# Altium footprint library SamacSys.PcbLib: 1008 footprints (part 39 of 63)
Each footprint in its own frame and in the unit in brackets; x right, y up, seen from the top. Pads: shape width x height; smd on the part's side, far side on the other; paste and mask are expansions set on the pad; w line width, h text height; cw(c..) or ccw(c..) is an arc to the next point about the centre after c.
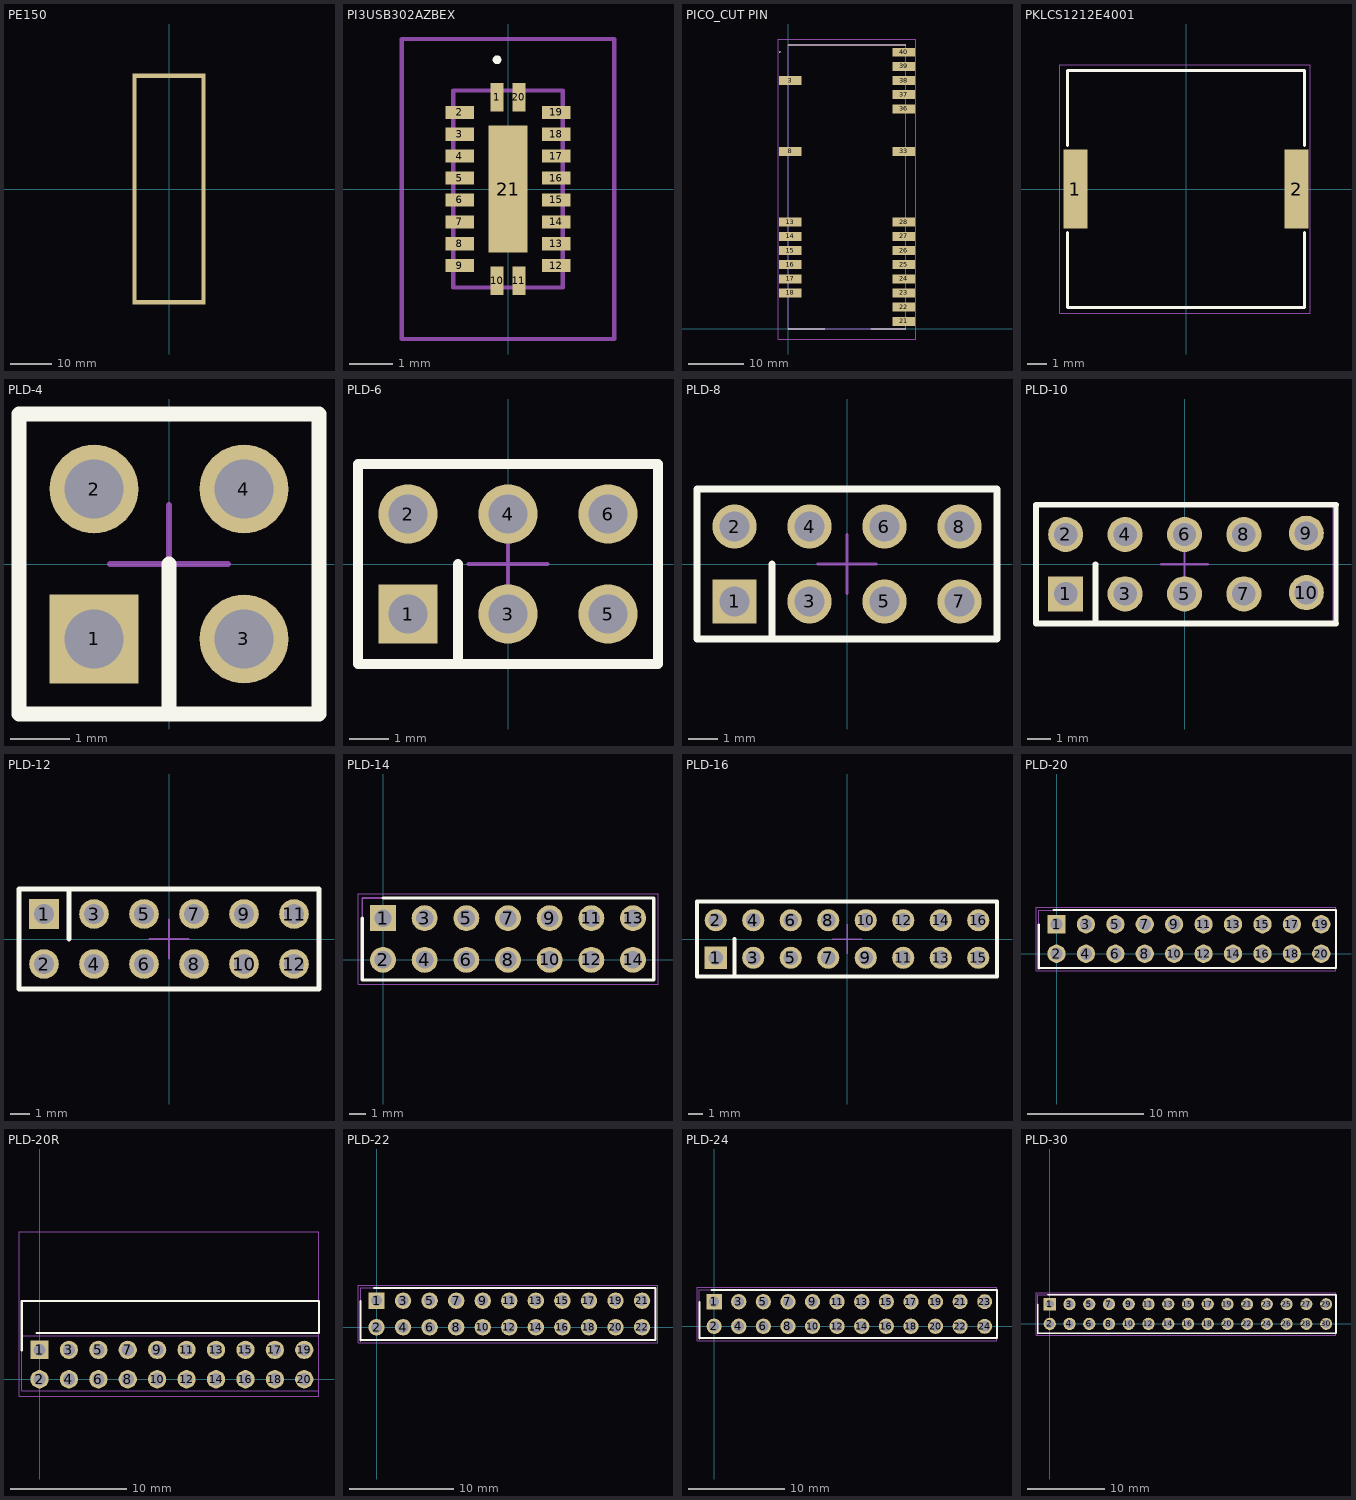
[diagram p38: the footprints below, top view; thin cyan lines are the x and y axes]

## PE150 [mm] "RF COVER"
pads (4):
  rect 1x55.4 smd: 1(-8.3,0) 1(8.3,0)
  rect 17.6x1 smd: 1(0,-27.2) 1(0,27.2)

## PI3USB302AZBEX [mm]
pads (21):
  rect 0.3x0.65 smd: 1(-0.25,2.1) 10(-0.25,-2.1) 11(0.25,-2.1) 20(0.25,2.1)
  rect 0.65x0.3 smd: 2(-1.1,1.75) 3(-1.1,1.25) 4(-1.1,0.75) 5(-1.1,0.25) 6(-1.1,-0.25) 7(-1.1,-0.75) 8(-1.1,-1.25) 9(-1.1,-1.75) 12(1.1,-1.75) 13(1.1,-1.25) 14(1.1,-0.75) 15(1.1,-0.25) 16(1.1,0.25) 17(1.1,0.75) 18(1.1,1.25) 19(1.1,1.75)
  rect 0.9x2.9 smd: 21(0,0)
Top Overlay:
  lines w0.1: -0.25,2.9 ccw(c-0.25,2.95) -0.25,3 ccw(c-0.25,2.95) -0.25,2.9
Assembly:
  lines w0.1: -1.25,-2.25 1.25,-2.25 1.25,2.25 -1.25,2.25 -1.25,-2.25
Countryard:
  lines w0.1: -2.425,-3.425 2.425,-3.425 2.425,3.425 -2.425,3.425 -2.425,-3.425
3D body "PI3USB302-AZBEX.stp": height 1.1, standoff 0, extent -1.25,-2.25 1.25,2.25

## PICO_CUT PIN [mm]
pads (22):
  rect 4x1.6 smd: 3(0.31,44.55) 8(0.31,31.85) 13(0.31,19.15) 14(0.31,16.61) 15(0.31,14.07) 16(0.31,11.53) 17(0.31,8.99) 18(0.31,6.45) 21(20.69,1.37) 22(20.69,3.91) 23(20.69,6.45) 24(20.69,8.99) 25(20.69,11.53) 26(20.69,14.07) 27(20.69,16.61) 28(20.69,19.15) 33(20.69,31.85) 36(20.69,39.47) 37(20.69,42.01) 38(20.69,44.55) 39(20.69,47.09) 40(20.69,49.63)
Top Overlay:
  lines w0.1: 0,0 6.5,0 0,0 ; 0,51 21,51 0,51 ; 14.75,0 21,0 14.75,0
  lines w0.2: -1.6,49.7 ccw(c-1.55,49.7) -1.5,49.7 ; -1.6,49.7 cw(c-1.55,49.7) -1.5,49.7 ; -1.6,49.7 ccw(c-1.55,49.7) -1.5,49.7
Assembly:
  lines w0.2: 0,0 21,0 21,51 0,51 0,0
Countryard:
  lines w0.1: -1.79,-1.8 22.79,-1.8 22.79,52 -1.79,52 -1.79,-1.8
3D body "PICO.stp": height 3.69, standoff 0, extent 0,0.03 21,52.456

## PKLCS1212E4001 [mm]
pads (2):
  rect 1.2x4 smd: 1(-5.6,0) 2(5.6,0)
Top Overlay:
  lines w0.15: -6,-2.2 -6,-6 6,-6 6,-2.2 ; -6,2.2 -6,6 6,6 6,2.2
Countryard:
  lines w0.015: -6.4,-6.3 6.3,-6.3 6.3,6.3 -6.4,6.3 -6.4,-6.3
3D body "PKLCS1212E4001-R1.stp": height 3, standoff 0, extent -6.05,-6 5.95,6

## PLD-4 [mm]
height 10
pads (4):
  rect 1.5x1.5 hole 1: 1(-1.27,-1.27)
  round 1.5 hole 1: 2(-1.27,1.27) 3(1.27,-1.27) 4(1.27,1.27)
Top Overlay:
  lines w0.25: 0,-2.54 0,0 ; -2.54,-2.54 -2.54,2.54 2.54,2.54 2.54,-2.54 -2.54,-2.54
Assembly:
  lines w0.1: 0,-2.27 0,0 ; -2.54,-2.54 2.54,-2.54 2.54,2.54 -2.54,2.54 -2.54,-2.54
Countryard:
  lines w0.1: -1,0 1,0 ; 0,-1 0,1 ; -2.54,-2.54 -2.54,2.54 2.54,2.54 2.54,-2.54 -2.54,-2.54

## PLD-6 [mm]
height 10
pads (6):
  rect 1.5x1.5 hole 1: 1(-2.54,-1.27)
  round 1.5 hole 1: 2(-2.54,1.27) 3(0,-1.27) 4(0,1.27) 5(2.54,-1.27) 6(2.54,1.27)
Top Overlay:
  lines w0.25: -1.27,-2.54 -1.27,0 ; -3.81,-2.54 3.81,-2.54 3.81,2.54 -3.81,2.54 -3.81,-2.54
Assembly:
  lines w0.1: -1.27,-2.27 -1.27,0 ; 3.81,-2.54 -3.81,-2.54 -3.81,2.54 3.81,2.54
Countryard:
  lines w0.1: -1,0 1,0 ; 0,-1 0,1 ; 3.81,-2.54 -3.81,-2.54 -3.81,2.54 3.81,2.54
3D body "User Library-PLD6.STEP": height 8.54, standoff -3, extent -3.81,-2.54 3.81,2.54

## PLD-8 [mm]
height 10
pads (8):
  rect 1.5x1.5 hole 1: 1(-3.81,-1.27)
  round 1.5 hole 1: 2(-3.81,1.27) 3(-1.27,-1.27) 4(-1.27,1.27) 5(1.27,-1.27) 6(1.27,1.27) 7(3.81,-1.27) 8(3.81,1.27)
Top Overlay:
  lines w0.25: -2.54,-2.54 -2.54,0 ; -5.08,-2.54 5.08,-2.54 5.08,2.54 -5.08,2.54 -5.08,-2.54
Assembly:
  lines w0.1: -2.54,-2.27 -2.54,0 ; -5.08,-2.54 -5.08,2.54 5.08,2.54 5.08,-2.54 -5.08,-2.54
Countryard:
  lines w0.1: -1,0 1,0 ; 0,-1 0,1 ; -5.08,-2.54 5.08,-2.54 5.08,2.54 -5.08,2.54 -5.08,-2.54
3D body "PLD-8.step": height 8.6, standoff -3, extent -5.08,-2.5 5.08,2.58

## PLD-10 [mm]
pads (10):
  rect 1.5x1.5 hole 1: 1(-5.08,-1.27)
  round 1.5 hole 1: 2(-5.08,1.27) 3(-2.54,-1.27) 4(-2.54,1.27) 5(0,-1.27) 6(0,1.27) 7(2.54,-1.27) 8(2.54,1.27) 9(5.208,1.327) 10(5.208,-1.213)
Top Overlay:
  lines w0.2: 6.478,-2.443 6.478,2.557
  lines w0.25: -3.81,-2.54 -3.81,0 ; 6.478,-2.54 -6.35,-2.54 -6.35,2.54 6.478,2.54
Assembly:
  lines w0.1: -3.81,-2.27 -3.81,0 ; 3.81,-2.54 -6.35,-2.54 -6.35,2.54 6.478,2.54 ; 6.478,-2.443 6.478,2.557
Countryard:
  lines w0.05: 6.35,-2.54 6.35,2.54
  lines w0.1: -1,0 1,0 ; 0,-1 0,1 ; 3.81,-2.54 -6.35,-2.54 -6.35,2.54 6.478,2.54
3D body "User Library-PLD10.STEP": height 8.54, standoff -3, extent -6.35,-2.54 6.35,2.54

## PLD-12 [mm]
height 10
pads (12):
  rect 1.5x1.5 hole 1: 1(-6.35,1.27)
  round 1.5 hole 1: 2(-6.35,-1.27) 3(-3.81,1.27) 4(-3.81,-1.27) 5(-1.27,1.27) 6(-1.27,-1.27) 7(1.27,1.27) 8(1.27,-1.27) 9(3.81,1.27) 10(3.81,-1.27) 11(6.35,1.27) 12(6.35,-1.27)
Top Overlay:
  lines w0.25: -5.08,0 -5.08,2.54 ; -7.62,-2.54 7.62,-2.54 7.62,2.54 -7.62,2.54 -7.62,-2.54
Assembly:
  lines w0.1: -5.08,0 -5.08,2.27 ; -7.62,-2.54 7.62,-2.54 7.62,2.54 -7.62,2.54 -7.62,-2.54
Countryard:
  lines w0.1: -1,0 1,0 ; 0,-1 0,1 ; -7.62,-2.54 7.62,-2.54 7.62,2.54 -7.62,2.54 -7.62,-2.54
3D body "PLS-6.STEP": height 8.9, standoff -2.9, extent -7.62,-2.54 7.62,0
3D body "PLS-6.STEP": height 8.9, standoff -2.9, extent -7.62,0 7.62,2.54

## PLD-14 [mm]
pads (14):
  rect 1.575x1.575 hole 1.05: 1(0,2.54)
  round 1.575 hole 1.05: 2(0,0) 3(2.54,2.54) 4(2.54,0) 5(5.08,2.54) 6(5.08,0) 7(7.62,2.54) 8(7.62,0) 9(10.16,2.54) 10(10.16,0) 11(12.7,2.54) 12(12.7,0) 13(15.24,2.54) 14(15.24,0)
Top Overlay:
  lines w0.2: -1.27,2.54 -1.27,-1.23 16.51,-1.23 16.51,3.77 0,3.77
Assembly:
  lines w0.1: -1.27,-1.23 -1.27,3.77 16.51,3.77 16.51,-1.23 -1.27,-1.23
Countryard:
  lines w0.05: -1.524,-1.48 -1.524,4.02 16.764,4.02 16.764,-1.48 -1.524,-1.48
3D body "User Library-PLD10.STEP": height 8.54, standoff -3, extent -1.27,-1.27 11.43,3.81
3D body "User Library-PLD4.STEP": height 8.54, standoff -3, extent 11.43,-1.27 16.51,3.81

## PLD-16 [mm]
height 10
pads (16):
  rect 1.5x1.5 hole 1: 1(-8.89,-1.27)
  round 1.5 hole 1: 2(-8.89,1.27) 3(-6.35,-1.27) 4(-6.35,1.27) 5(-3.81,-1.27) 6(-3.81,1.27) 7(-1.27,-1.27) 8(-1.27,1.27) 9(1.27,-1.27) 10(1.27,1.27) 11(3.81,-1.27) 12(3.81,1.27) 13(6.35,-1.27) 14(6.35,1.27) 15(8.89,-1.27) 16(8.89,1.27)
Top Overlay:
  lines w0.25: -7.62,-2.54 -7.62,0 ; -10.16,-2.54 -10.16,2.54 0,2.54 10.16,2.54 10.16,-2.54 0,-2.54 -10.16,-2.54
Assembly:
  lines w0.1: -7.62,-2.27 -7.62,0 ; -10.16,-2.54 0,-2.54 10.16,-2.54 10.16,2.54 0,2.54 -10.16,2.54 -10.16,-2.54
Countryard:
  lines w0.1: -1,0 1,0 ; 0,-1 0,1 ; -10.16,-2.54 -10.16,2.54 0,2.54 10.16,2.54 10.16,-2.54 0,-2.54 -10.16,-2.54
3D body "PLD-8.step": height 8.6, standoff -3, extent 0,-2.58 10.16,2.5
3D body "PLD-8.step": height 8.6, standoff -3, extent -10.16,-2.5 0,2.58

## PLD-20 [mm]
pads (20):
  rect 1.575x1.575 hole 1.05: 1(0,2.54)
  round 1.575 hole 1.05: 2(0,0) 3(2.54,2.54) 4(2.54,0) 5(5.08,2.54) 6(5.08,0) 7(7.62,2.54) 8(7.62,0) 9(10.16,2.54) 10(10.16,0) 11(12.7,2.54) 12(12.7,0) 13(15.24,2.54) 14(15.24,0) 15(17.78,2.54) 16(17.78,0) 17(20.32,2.54) 18(20.32,0) 19(22.86,2.54) 20(22.86,0)
Top Overlay:
  lines w0.2: -1.524,-1.23 24.13,-1.23 24.13,3.77 -0.254,3.77 ; -1.52,-1.27 -1.52,2.5
Assembly:
  lines w0.1: -1.524,-1.23 24.13,-1.23 24.13,3.77 -1.524,3.77 -1.524,-1.23
Countryard:
  lines w0.05: -1.77,-1.48 24.13,-1.48 24.13,4.02 -1.77,4.02 -1.77,-1.48
3D body "User Library-PLD4.STEP": height 8.54, standoff -3, extent 19.05,-1.27 24.13,3.81
3D body "User Library-PLD10.STEP": height 8.54, standoff -3, extent -1.27,-1.27 11.43,3.81
3D body "User Library-PLD4.STEP": height 8.54, standoff -3, extent 11.43,-1.27 16.51,3.81
3D body "User Library-PLD4.STEP": height 8.54, standoff -3, extent 16.51,-1.27 21.59,3.81

## PLD-20R [mm]
pads (20):
  rect 1.575x1.575 hole 1.05: 1(0,2.54)
  round 1.575 hole 1.05: 2(0,0) 3(2.54,2.54) 4(2.54,0) 5(5.08,2.54) 6(5.08,0) 7(7.62,2.54) 8(7.62,0) 9(10.16,2.54) 10(10.16,0) 11(12.7,2.54) 12(12.7,0) 13(15.24,2.54) 14(15.24,0) 15(17.78,2.54) 16(17.78,0) 17(20.32,2.54) 18(20.32,0) 19(22.86,2.54) 20(22.86,0)
Top Overlay:
  lines w0.2: -1.52,2.5 -1.52,6.75 24.13,6.75 24.13,4 -0.254,4
Assembly:
  lines w0.1: -1.524,-1 24.13,-1 24.13,3.77 -1.524,3.77 -1.524,-1
Countryard:
  lines w0.05: -1.77,-1.48 24.13,-1.48 24.13,12.75 -1.77,12.75 -1.77,-1.48
3D body "PLD-20R1.step": height 5.08, standoff -3, extent -1.27,-0.36 24.13,12.68

## PLD-22 [mm]
pads (22):
  rect 1.575x1.575 hole 1.05: 1(0,2.54)
  round 1.575 hole 1.05: 2(0,0) 3(2.54,2.54) 4(2.54,0) 5(5.08,2.54) 6(5.08,0) 7(7.62,2.54) 8(7.62,0) 9(10.16,2.54) 10(10.16,0) 11(12.7,2.54) 12(12.7,0) 13(15.24,2.54) 14(15.24,0) 15(17.78,2.54) 16(17.78,0) 17(20.32,2.54) 18(20.32,0) 19(22.86,2.54) 20(22.86,0) 21(25.4,2.54) 22(25.4,0)
Top Overlay:
  lines w0.2: -1.524,-1.23 26.67,-1.23 26.67,3.77 -0.254,3.77 ; -1.52,-1.27 -1.52,2.5
Assembly:
  lines w0.1: -1.524,-1.23 26.67,-1.23 26.67,3.77 -1.524,3.77 -1.524,-1.23
Countryard:
  lines w0.05: -1.77,-1.48 26.924,-1.48 26.924,4.02 -1.77,4.02 -1.77,-1.48
3D body "User Library-PLD10.STEP": height 8.54, standoff -3, extent -1.27,-1.27 11.43,3.81
3D body "User Library-PLD4.STEP": height 8.54, standoff -3, extent 11.43,-1.27 16.51,3.81
3D body "User Library-PLD4.STEP": height 8.54, standoff -3, extent 16.51,-1.27 21.59,3.81
3D body "User Library-PLD4.STEP": height 8.54, standoff -3, extent 21.59,-1.27 26.67,3.81

## PLD-24 [mm]
pads (24):
  rect 1.575x1.575 hole 1.05: 1(0,2.54)
  round 1.575 hole 1.05: 2(0,0) 3(2.54,2.54) 4(2.54,0) 5(5.08,2.54) 6(5.08,0) 7(7.62,2.54) 8(7.62,0) 9(10.16,2.54) 10(10.16,0) 11(12.7,2.54) 12(12.7,0) 13(15.24,2.54) 14(15.24,0) 15(17.78,2.54) 16(17.78,0) 17(20.32,2.54) 18(20.32,0) 19(22.86,2.54) 20(22.86,0)
  round 1.55 hole 1.05: 21(25.4,2.54) 22(25.4,0) 23(27.94,2.54) 24(27.94,0)
Top Overlay:
  lines w0.2: -1.524,-1.23 29.21,-1.23 29.21,3.77 -0.254,3.77 ; -1.52,-1.27 -1.52,2.5
Assembly:
  lines w0.1: -1.524,-1.23 -1.524,3.77 29.21,3.77 29.21,-1.23 -1.524,-1.23
Countryard:
  lines w0.05: -1.77,-1.48 -1.77,4.02 29.21,4.02 29.21,-1.48 -1.77,-1.48
3D body "User Library-PLD10.STEP": height 8.54, standoff -3, extent 11.43,-1.27 24.13,3.81
3D body "User Library-PLD10.STEP": height 8.54, standoff -3, extent -1.27,-1.27 11.43,3.81
3D body "User Library-PLD4.STEP": height 8.54, standoff -3, extent 24.13,-1.27 29.21,3.81

## PLD-30 [mm]
pads (30):
  rect 1.575x1.575 hole 1.05: 1(0,2.54)
  round 1.575 hole 1.05: 2(0,0) 3(2.54,2.54) 4(2.54,0) 5(5.08,2.54) 6(5.08,0) 7(7.62,2.54) 8(7.62,0) 9(10.16,2.54) 10(10.16,0) 11(12.7,2.54) 12(12.7,0) 13(15.24,2.54) 14(15.24,0) 15(17.78,2.54) 16(17.78,0) 17(20.32,2.54) 18(20.32,0) 19(22.86,2.54) 20(22.86,0)
  round 1.55 hole 1.05: 21(25.4,2.54) 22(25.4,0) 23(27.94,2.54) 24(27.94,0) 25(30.48,2.54) 26(30.48,0) 27(33.02,2.54) 28(33.02,0) 29(35.56,2.54) 30(35.56,0)
Top Overlay:
  lines w0.2: -1.524,-1.23 36.83,-1.23 36.83,3.77 -0.254,3.77 ; -1.52,-1.27 -1.52,2.5
Assembly:
  lines w0.1: -1.524,-1.23 -1.524,3.77 36.83,3.77 36.83,-1.23 -1.524,-1.23
Countryard:
  lines w0.05: -1.77,-1.48 -1.77,4.02 36.83,4.02 36.83,-1.48 -1.77,-1.48
3D body "User Library-PLD10.STEP": height 8.54, standoff -3, extent 24.13,-1.27 36.83,3.81
3D body "User Library-PLD4.STEP": height 8.54, standoff -3, extent 11.43,-1.27 16.51,3.81
3D body "User Library-PLD10.STEP": height 8.54, standoff -3, extent -1.27,-1.27 11.43,3.81
3D body "User Library-PLD4.STEP": height 8.54, standoff -3, extent 19.05,-1.27 24.13,3.81
3D body "User Library-PLD4.STEP": height 8.54, standoff -3, extent 16.51,-1.27 21.59,3.81